# Altium footprint library 1.10-电容.PcbLib: 193 footprints (part 4 of 13)
Each footprint in its own frame and in the unit in brackets; x right, y up, seen from the top. Pads: shape width x height; smd on the part's side, far side on the other; paste and mask are expansions set on the pad; w line width, h text height; cw(c..) or ccw(c..) is an arc to the next point about the centre after c.
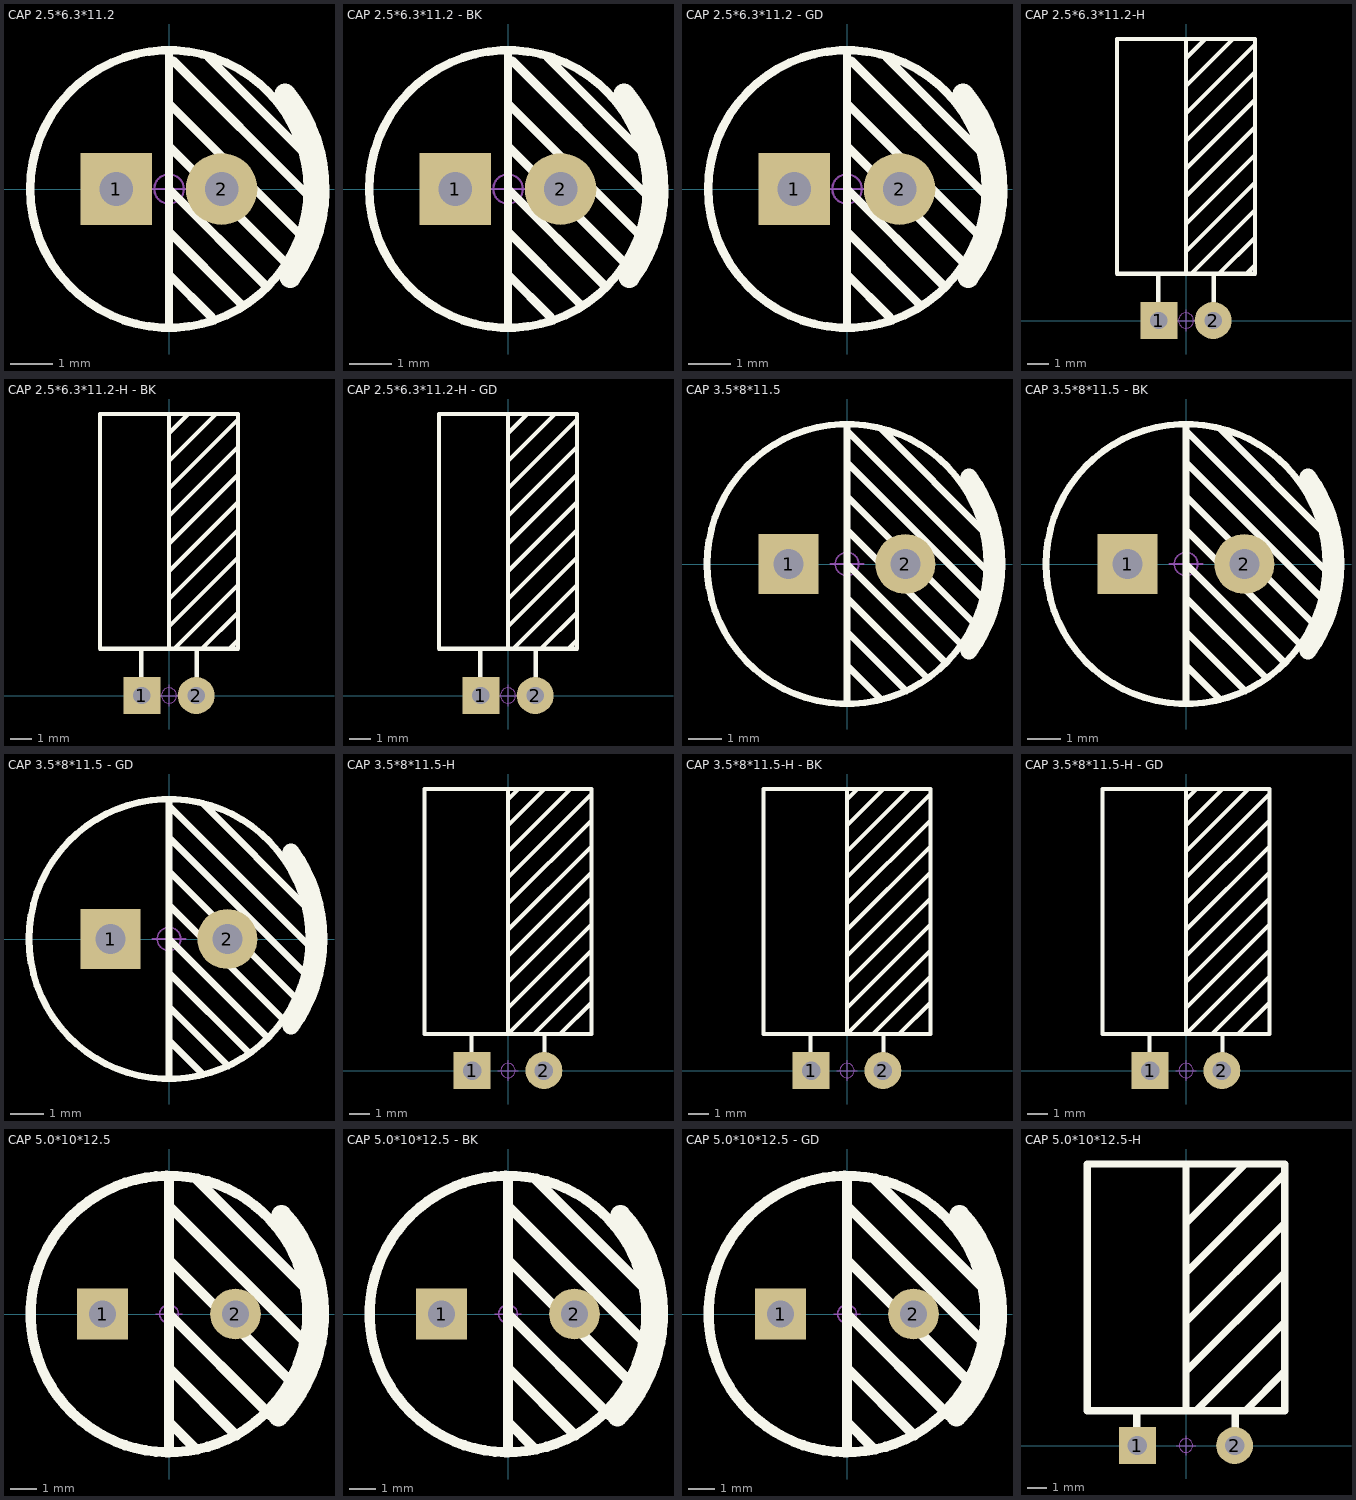
[diagram p3: the footprints below, top view; thin cyan lines are the x and y axes]

## CAP 2.5*6.3*11.2 [mm] "脚距2.5mm直径6.3mm高度11.2mm"
pads (2):
  rect 1.7x1.7 hole 0.8: 1(-1.25,0)
  round 1.7 hole 0.8: 2(1.25,0)
Top Overlay:
  circle w0.2: c0,0 r3.3
  lines w0.2: 0,-3.226 0,3.277 ; 0,-2.032 1.016,-3.048 ; 0,-1.016 1.727,-2.743 ; 0,0 2.299,-2.299 ; 0,1.016 2.769,-1.753 2.87,-1.753 ; 0,2.032 3.099,-1.067 ; 0,3.048 0.102,3.048 3.302,-0.152 ; 0.927,3.137 3.124,0.94 3.2,0.94
  lines w0.504: 2.759,2.258 cw(c0,0) 2.883,-2.097
Mechanical 15:
  circle w0.05: c0,0 r0.35
  lines w0.05: -0.5,0 0.5,0 ; 0,-0.5 0,0.5
3D body "CAP 2.5X6.3X11.2.STEP": height 11.23, standoff -3.38, extent -3.15,-3.15 3.16,3.15

## CAP 2.5*6.3*11.2 - BK [mm] "脚距2.5mm直径6.3mm高度11.2mm             淘宝ID:黄晶宝石"
pads (2):
  rect 1.7x1.7 hole 0.8: 1(-1.25,0)
  round 1.7 hole 0.8: 2(1.25,0)
Top Overlay:
  circle w0.2: c0,0 r3.3
  lines w0.2: 0,-3.226 0,3.277 ; 0,-2.032 1.016,-3.048 ; 0,-1.016 1.727,-2.743 ; 0,0 2.299,-2.299 ; 0,1.016 2.769,-1.753 2.87,-1.753 ; 0,2.032 3.099,-1.067 ; 0,3.048 0.102,3.048 3.302,-0.152 ; 0.927,3.137 3.124,0.94 3.2,0.94
  lines w0.504: 2.759,2.258 cw(c0,0) 2.883,-2.097
Mechanical 15:
  circle w0.05: c0,0 r0.35
  lines w0.05: -0.5,0 0.5,0 ; 0,-0.5 0,0.5
3D body "CAP 2.5X6.3X11.2.STEP": height 11.24, standoff -3.37, extent -3.15,-3.15 3.16,3.15

## CAP 2.5*6.3*11.2 - GD [mm] "脚距2.5mm直径6.3mm高度11.2mm"
pads (2):
  rect 1.7x1.7 hole 0.8: 1(-1.25,0)
  round 1.7 hole 0.8: 2(1.25,0)
Top Overlay:
  circle w0.2: c0,0 r3.3
  lines w0.2: 0,-3.226 0,3.277 ; 0,-2.032 1.016,-3.048 ; 0,-1.016 1.727,-2.743 ; 0,0 2.299,-2.299 ; 0,1.016 2.769,-1.753 2.87,-1.753 ; 0,2.032 3.099,-1.067 ; 0,3.048 0.102,3.048 3.302,-0.152 ; 0.927,3.137 3.124,0.94 3.2,0.94
  lines w0.504: 2.759,2.258 cw(c0,0) 2.883,-2.097
Mechanical 15:
  circle w0.05: c0,0 r0.35
  lines w0.05: -0.5,0 0.5,0 ; 0,-0.5 0,0.5
3D body "CAP 2.5X6.3X11.2.STEP": height 11.24, standoff -3.37, extent -3.15,-3.15 3.16,3.15

## CAP 2.5*6.3*11.2-H [mm] "脚距2.5mm直径6.3mm高度11.2mm"
pads (2):
  rect 1.7x1.7 hole 0.8: 1(-1.25,0)
  round 1.7 hole 0.8: 2(1.25,0)
Top Overlay:
  lines w0.2: -1.27,0.635 -1.27,2.032 ; 0,2.159 0,12.954 ; 0,3.175 3.175,6.35 ; 0,4.445 3.175,7.62 ; 0,5.715 3.175,8.89 ; 0,6.985 3.175,10.16 ; 0,8.255 3.175,11.43 ; 0,9.525 3.175,12.7 ; 0,10.795 2.159,12.954 ; 0,12.065 0.889,12.954 ; 0.254,2.159 3.175,5.08 3.175,4.953 ; 1.27,0.635 1.27,2.159 ; 1.524,2.159 3.175,3.81 ; 2.794,2.159 3.175,2.54 ; -3.175,2.159 3.175,2.159 3.175,12.954 -3.175,12.954 -3.175,2.159
Mechanical 15:
  circle w0.05: c0,0 r0.35
  lines w0.05: -0.5,0 0.5,0 ; 0,-0.5 0,0.5
3D body "CAP 2.5X6.3X11.2-H.STEP": height 6.32, standoff -3.48, extent -3.15,-0.3 3.16,13.11

## CAP 2.5*6.3*11.2-H - BK [mm] "脚距2.5mm直径6.3mm高度11.2mm"
pads (2):
  rect 1.7x1.7 hole 0.8: 1(-1.25,0)
  round 1.7 hole 0.8: 2(1.25,0)
Top Overlay:
  lines w0.2: -1.27,0.635 -1.27,2.032 ; 0,2.159 0,12.954 ; 0,3.175 3.175,6.35 ; 0,4.445 3.175,7.62 ; 0,5.715 3.175,8.89 ; 0,6.985 3.175,10.16 ; 0,8.255 3.175,11.43 ; 0,9.525 3.175,12.7 ; 0,10.795 2.159,12.954 ; 0,12.065 0.889,12.954 ; 0.254,2.159 3.175,5.08 3.175,4.953 ; 1.27,0.635 1.27,2.159 ; 1.524,2.159 3.175,3.81 ; 2.794,2.159 3.175,2.54 ; -3.175,2.159 3.175,2.159 3.175,12.954 -3.175,12.954 -3.175,2.159
Mechanical 15:
  circle w0.05: c0,0 r0.35
  lines w0.05: -0.5,0 0.5,0 ; 0,-0.5 0,0.5
3D body "CAP 2.5X6.3X11.2-H.STEP": height 6.32, standoff -3.48, extent -3.15,-0.3 3.16,13.11

## CAP 2.5*6.3*11.2-H - GD [mm] "脚距2.5mm直径6.3mm高度11.2mm"
pads (2):
  rect 1.7x1.7 hole 0.8: 1(-1.25,0)
  round 1.7 hole 0.8: 2(1.25,0)
Top Overlay:
  lines w0.2: -1.27,0.635 -1.27,2.032 ; 0,2.159 0,12.954 ; 0,3.175 3.175,6.35 ; 0,4.445 3.175,7.62 ; 0,5.715 3.175,8.89 ; 0,6.985 3.175,10.16 ; 0,8.255 3.175,11.43 ; 0,9.525 3.175,12.7 ; 0,10.795 2.159,12.954 ; 0,12.065 0.889,12.954 ; 0.254,2.159 3.175,5.08 3.175,4.953 ; 1.27,0.635 1.27,2.159 ; 1.524,2.159 3.175,3.81 ; 2.794,2.159 3.175,2.54 ; -3.175,2.159 -3.175,12.954 3.175,12.954 3.175,2.159 -3.175,2.159
Mechanical 15:
  circle w0.05: c0,0 r0.35
  lines w0.05: -0.5,0 0.5,0 ; 0,-0.5 0,0.5
3D body "CAP 2.5X6.3X11.2-H.STEP": height 6.32, standoff -3.48, extent -3.15,-0.3 3.16,13.11

## CAP 3.5*8*11.5 [mm] "脚距3.5mm直径8mm高度11.5mm"
pads (2):
  rect 1.8x1.8 hole 0.9: 1(-1.75,0)
  round 1.8 hole 0.9: 2(1.75,0)
Top Overlay:
  circle w0.2: c0,0 r4.2
  lines w0.2: 0,-4.191 0,4 ; 0,-3.048 1.016,-4.064 ; 0,-2.032 1.778,-3.81 ; 0,-1.016 2.413,-3.429 ; 0,0 2.921,-2.921 ; 0,1.016 3.429,-2.413 ; 0,2.032 3.81,-1.778 ; 0,3.048 4.064,-1.016 ; 0,4.191 0,4 ; 1.016,4.064 4.191,0.889 ; 4.191,-0.127 4.127,-0.127 0,4
  lines w0.504: 3.663,-2.616 ccw(c0,0) 3.663,2.616
Mechanical 15:
  circle w0.05: c0,0 r0.35
  lines w0.05: -0.5,0 0.5,0 ; 0,-0.5 0,0.5
3D body "CAP 3.5X8X11.5.STEP": height 11.53, standoff -3.38, extent -4,-4 4.01,4

## CAP 3.5*8*11.5 - BK [mm] "脚距3.5mm直径8mm高度11.5mm"
pads (2):
  rect 1.8x1.8 hole 0.9: 1(-1.75,0)
  round 1.8 hole 0.9: 2(1.75,0)
Top Overlay:
  circle w0.2: c0,0 r4.2
  lines w0.2: 0,-4.191 0,4 ; 0,-3.048 1.016,-4.064 ; 0,-2.032 1.778,-3.81 ; 0,-1.016 2.413,-3.429 ; 0,0 2.921,-2.921 ; 0,1.016 3.429,-2.413 ; 0,2.032 3.81,-1.778 ; 0,3.048 4.064,-1.016 ; 0,4.191 0,4 ; 1.016,4.064 4.191,0.889 ; 4.191,-0.127 4.127,-0.127 0,4
  lines w0.504: 3.663,-2.616 ccw(c0,0) 3.663,2.616
Mechanical 15:
  circle w0.05: c0,0 r0.35
  lines w0.05: -0.5,0 0.5,0 ; 0,-0.5 0,0.5
3D body "CAP 3.5X8X11.5.STEP": height 11.54, standoff -3.37, extent -4,-4 4.01,4

## CAP 3.5*8*11.5 - GD [mm] "脚距3.5mm直径8mm高度11.5mm"
pads (2):
  rect 1.8x1.8 hole 0.9: 1(-1.75,0)
  round 1.8 hole 0.9: 2(1.75,0)
Top Overlay:
  circle w0.2: c0,0 r4.2
  lines w0.2: 0,-4.191 0,4 ; 0,-3.048 1.016,-4.064 ; 0,-2.032 1.778,-3.81 ; 0,-1.016 2.413,-3.429 ; 0,0 2.921,-2.921 ; 0,1.016 3.429,-2.413 ; 0,2.032 3.81,-1.778 ; 0,3.048 4.064,-1.016 ; 0,4.191 0,4 ; 1.016,4.064 4.191,0.889 ; 4.191,-0.127 4.127,-0.127 0,4
  lines w0.504: 3.663,-2.616 ccw(c0,0) 3.663,2.616
Mechanical 15:
  circle w0.05: c0,0 r0.35
  lines w0.05: -0.5,0 0.5,0 ; 0,-0.5 0,0.5
3D body "CAP 3.5X8X11.5.STEP": height 11.54, standoff -3.37, extent -4,-4 4.01,4

## CAP 3.5*8*11.5-H [mm] "脚距3.5mm直径8mm高度11.5mm"
pads (2):
  rect 1.8x1.8 hole 0.9: 1(-1.75,0)
  round 1.8 hole 0.9: 2(1.75,0)
Top Overlay:
  lines w0.2: -1.778,0.762 -1.778,1.778 ; 0,3.048 4.064,7.112 ; 0,4.318 4.064,8.382 ; 0,5.588 4.064,9.652 ; 0,6.858 4.064,10.922 ; 0,8.128 4.064,12.192 ; 0,9.398 4.064,13.462 ; 0,10.668 3.048,13.716 ; 0,11.938 1.778,13.716 ; 0,13.208 0.508,13.716 ; 0,13.716 0,1.778 4.064,5.842 ; 1.27,1.778 4.064,4.572 ; 1.778,0.762 1.778,1.778 ; 2.54,1.778 4.064,3.302 ; -4.064,1.778 -4.064,13.716 4.064,13.716 4.064,1.778 -4.064,1.778
Mechanical 15:
  circle w0.05: c0,0 r0.35
  lines w0.05: -0.5,0 0.5,0 ; 0,-0.5 0,0.5
3D body "CAP 3.5X8X11.5-H.STEP": height 8.03, standoff -2.62, extent -4,-0.3 4.01,13.41

## CAP 3.5*8*11.5-H - BK [mm] "脚距3.5mm直径8mm高度11.5mm"
pads (2):
  rect 1.8x1.8 hole 0.9: 1(-1.75,0)
  round 1.8 hole 0.9: 2(1.75,0)
Top Overlay:
  lines w0.2: -1.778,0.762 -1.778,1.778 ; 0,3.048 4.064,7.112 ; 0,4.318 4.064,8.382 ; 0,5.588 4.064,9.652 ; 0,6.858 4.064,10.922 ; 0,8.128 4.064,12.192 ; 0,9.398 4.064,13.462 ; 0,10.668 3.048,13.716 ; 0,11.938 1.778,13.716 ; 0,13.208 0.508,13.716 ; 0,13.716 0,1.778 4.064,5.842 ; 1.27,1.778 4.064,4.572 ; 1.778,0.762 1.778,1.778 ; 2.54,1.778 4.064,3.302 ; -4.064,1.778 -4.064,13.716 4.064,13.716 4.064,1.778 -4.064,1.778
Mechanical 15:
  circle w0.05: c0,0 r0.35
  lines w0.05: -0.5,0 0.5,0 ; 0,-0.5 0,0.5
3D body "CAP 3.5X8X11.5-H.STEP": height 8.03, standoff -3.48, extent -4,-0.3 4.01,13.41

## CAP 3.5*8*11.5-H - GD [mm] "脚距3.5mm直径8mm高度11.5mm"
pads (2):
  rect 1.8x1.8 hole 0.9: 1(-1.75,0)
  round 1.8 hole 0.9: 2(1.75,0)
Top Overlay:
  lines w0.2: -1.778,0.762 -1.778,1.778 ; 0,3.048 4.064,7.112 ; 0,4.318 4.064,8.382 ; 0,5.588 4.064,9.652 ; 0,6.858 4.064,10.922 ; 0,8.128 4.064,12.192 ; 0,9.398 4.064,13.462 ; 0,10.668 3.048,13.716 ; 0,11.938 1.778,13.716 ; 0,13.208 0.508,13.716 ; 0,13.716 0,1.778 4.064,5.842 ; 1.27,1.778 4.064,4.572 ; 1.778,0.762 1.778,1.778 ; 2.54,1.778 4.064,3.302 ; -4.064,1.778 4.064,1.778 4.064,13.716 -4.064,13.716 -4.064,1.778
Mechanical 15:
  circle w0.05: c0,0 r0.35
  lines w0.05: -0.5,0 0.5,0 ; 0,-0.5 0,0.5
3D body "CAP 3.5X8X11.5-H.STEP": height 8.03, standoff -3.48, extent -4,-0.3 4.01,13.41

## CAP 5.0*10*12.5 [mm] "脚距5mm直径10mm高度12.5mm"
pads (2):
  rect 1.9x1.9 hole 1: 1(-2.5,0)
  round 1.9 hole 1: 2(2.5,0)
Top Overlay:
  circle w0.381: c0,0 r5.2
  lines w0.381: 0,-5.207 0,5.08 ; 0,-4.064 1.016,-5.08 ; 0,-2.032 2.54,-4.572 ; 0,-1.016 0,-0.508 ; 0,0 3.81,-3.81 ; 0,2.032 4.572,-2.54 ; 0,4.064 5.08,-1.016 ; 1.016,5.08 5.588,0.508
  lines w0.75: 4.114,-3.857 ccw(c0,0) 4.229,3.731
Mechanical 15:
  circle w0.05: c0,0 r0.35
  lines w0.05: -0.5,0 0.5,0 ; 0,-0.5 0,0.5
3D body "CAP 5X10X12.5.STEP": height 12.55, standoff -3.36, extent -5.003,-5.006 5.007,4.993

## CAP 5.0*10*12.5 - BK [mm] "脚距5mm直径10mm高度12.5mm"
pads (2):
  rect 1.9x1.9 hole 1: 1(-2.5,0)
  round 1.9 hole 1: 2(2.5,0)
Top Overlay:
  circle w0.381: c0,0 r5.2
  lines w0.381: 0,-5.207 0,5.08 ; 0,-4.064 1.016,-5.08 ; 0,-2.032 2.54,-4.572 ; 0,-1.016 0,-0.508 ; 0,0 3.81,-3.81 ; 0,2.032 4.572,-2.54 ; 0,4.064 5.08,-1.016 ; 1.016,5.08 5.588,0.508
  lines w0.75: 4.114,-3.857 ccw(c0,0) 4.229,3.731
Mechanical 15:
  circle w0.05: c0,0 r0.35
  lines w0.05: -0.5,0 0.5,0 ; 0,-0.5 0,0.5
3D body "CAP 5X10X12.5.STEP": height 12.54, standoff -3.37, extent -5,-4.999 5.01,4.999

## CAP 5.0*10*12.5 - GD [mm] "脚距5mm直径10mm高度12.5mm"
pads (2):
  rect 1.9x1.9 hole 1: 1(-2.5,0)
  round 1.9 hole 1: 2(2.5,0)
Top Overlay:
  circle w0.381: c0,0 r5.2
  lines w0.381: 0,-5.207 0,5.08 ; 0,-4.064 1.016,-5.08 ; 0,-2.032 2.54,-4.572 ; 0,-1.016 0,-0.508 ; 0,0 3.81,-3.81 ; 0,2.032 4.572,-2.54 ; 0,4.064 5.08,-1.016 ; 1.016,5.08 5.588,0.508
  lines w0.75: 4.114,-3.857 ccw(c0,0) 4.229,3.731
Mechanical 15:
  circle w0.05: c0,0 r0.35
  lines w0.05: -0.5,0 0.5,0 ; 0,-0.5 0,0.5
3D body "CAP 5X10X12.5.STEP": height 12.54, standoff -3.37, extent -5,-4.999 5.01,4.999

## CAP 5.0*10*12.5-H [mm] "脚距5mm直径10mm高度12.5mm"
pads (2):
  rect 1.9x1.9 hole 1: 1(-2.5,0)
  round 1.9 hole 1: 2(2.5,0)
Top Overlay:
  lines w0.381: -2.54,0.762 -2.54,1.778 ; 0,1.778 0,14.41 ; 0,3.81 5.08,8.89 ; 0,6.35 5.08,11.43 ; 0,8.89 5.08,13.97 ; 0,11.43 3.048,14.478 ; 0.508,1.778 5.08,6.35 ; 2.54,0.762 2.54,1.778 ; 3.048,1.778 5.08,3.81 ; -5.08,1.778 -5.08,14.478 5.08,14.478 5.08,1.778 -5.08,1.778
Mechanical 15:
  circle w0.05: c0,0 r0.35
  lines w0.05: -0.5,0 0.5,0 ; 0,-0.5 0,0.5
3D body "CAP 5X10X12.5-H.STEP": height 10.03, standoff -3.47, extent -5,-0.3 5.01,14.41